# Altium schematic symbol library Inductor.SchLib: 326 symbols (part 5 of 7)
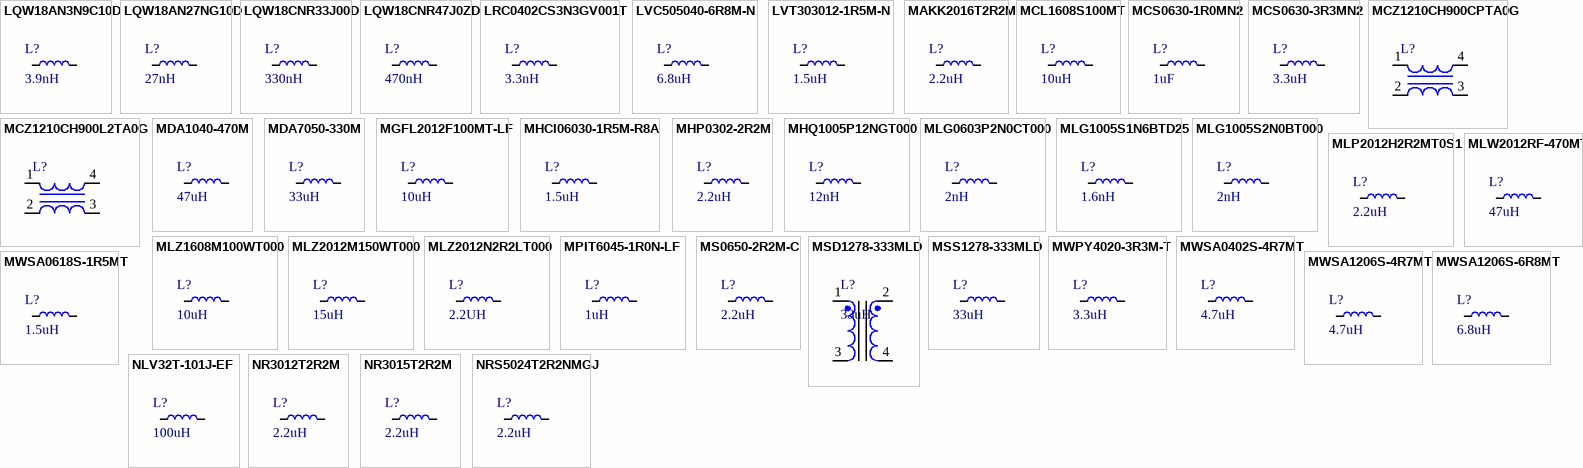
[diagram p12: symbols LQW18AN3N9C10D to NRS5024T2R2NMGJ]

## MLG1005S1N6BTD25
designator L?, comment 1.6nH
1A 1.6nH 50mΩ 0402 Inductors (SMD) ROHS; Manufacturer: TDK; Manufacturer Part Number: MLG1005S1N6BTD25; Core Material: Non-Magnetic,Ceramic; Shielding: Unshielded; DC Resistance (DCR): 120mR; Self Resonant Frequency: 7.5GHz; Test Frequency: 100MHz; Q Factor: 7; Supplier: Digi-Key; Supplier Part Number: 445-16268-1-ND; RoHS: Yes; Category: Fixed Inductors; Stock: 5130; Pricing: 1=0.15, 10=0.132, 25=0.112, 50=0.0988, 100=0.0906, 250=0.08232, 500=0.07738, 1000=0.05927, 2500=0.05598 (USD); Mounting Technology: Surface Mount; Case/Package: 0402; Case Code (Metric): 1005; Case Code (Imperial): 0402; Weight: 2.3E-05oz; Min Operating Temperature: -55°C; Max Operating Temperature: 125°C; Package Quantity: 1; Packaging: Tape and Reel; Current Rating: 1A; Value: 1.6nH; Termination: SMD/SMT; Max DC Current: 1A; Series: MLG; Length: 0.039inch; Width: 0.02inch; Height: 0.5mm; Height - Seated (Max): 0.022inch; Ratings: AEC-Q200; RoHS Compliant: Yes; ComponentLink1URL: https://datasheet.ciiva.com/29696/inductor-automotive-high-frequency-mlg-en-29696023.pdf?src-supplier=Digi-Key; ComponentLink1Description: https://datasheet.ciiva.com/29696/inductor-automotive-high-frequency-mlg-en-29696023.pdf?src-supplier=Digi-Key; ComponentLink2URL: https://datasheet.ciiva.com/29696/inductor-automotive-high-frequency-mlg-en-29696024.pdf?src-supplier=Digi-Key; ComponentLink2Description: https://datasheet.ciiva.com/29696/inductor-automotive-high-frequency-mlg-en-29696024.pdf?src-supplier=Digi-Key; ComponentLink3URL: https://datasheet.ciiva.com/29696/inductor-automotive-high-frequency-mlg-en-29696025.pdf?src-supplier=Digi-Key; ComponentLink3Description: https://datasheet.ciiva.com/29696/inductor-automotive-high-frequency-mlg-en-29696025.pdf?src-supplier=Digi-Key; LCSC Part Number: C404616; Item Type: Inductor
footprint IND-0402
pins: 1, 2

## MLG1005S2N0BT000
designator L?, comment 2nH
900mA 2nH 70mΩ 0402 Inductors (SMD) ROHS; Manufacturer: TDK; Manufacturer Part Number: MLG1005S2N0BT000; Supplier: Arrow Electronics; Supplier Part Number: MLG1005S2N0BT000; RoHS: Yes; Category: Fixed Inductors; Stock: 20000; Pricing: 10000=0.0364, 30000=0.0359, 50000=0.0316, 100000=0.0313 (USD); ComponentLink1URL: https://datasheet.ciiva.com/15987/awq40-15987110.pdf?src-supplier=Onlinecomponents.com; ComponentLink1Description: https://datasheet.ciiva.com/15987/awq40-15987110.pdf?src-supplier=Onlinecomponents.com; ComponentLink2URL: https://datasheet.ciiva.com/29696/inductor-commercial-high-frequency-mlg-en-29696229.pdf?src-supplier=Digi-Key; ComponentLink2Description: https://datasheet.ciiva.com/29696/inductor-commercial-high-frequency-mlg-en-29696229.pdf?src-supplier=Digi-Key; LCSC Part Number: C76769; Item Type: Inductor
footprint IND-0402
pins: 1, 2

## MLP2012H2R2MT0S1
designator L?, comment 2.2uH
FIXED IND 2.2UH 1A 195 MOHM SMD; Manufacturer: TDK; Manufacturer Part Number: MLP2012H2R2MT0S1; Item Type: Inductors; Value: 150mR; ESR: 195mR; Supplier: Digikey; LCSC Part Number: C383369; RoHS: Yes; Stock: 35365; Pricing: 1=0.29, 10=0.2, 25=0.1768, 50=0.1538, 100=0.1372, 250=0.1186 (USD); RMS Current (Irms): 1A; Height: 1mm; Lead Free: 5697LeadFree; ComponentLink1URL: https://datasheet.ciiva.com/29697/inductor-commercial-power-mlp-en-29697706.pdf?src-supplier=Digikey; ComponentLink1Description: https://datasheet.ciiva.com/29697/inductor-commercial-power-mlp-en-29697706.pdf?src-supplier=Digikey; ComponentLink2URL: https://datasheet.ciiva.com/29697/inductor-commercial-power-mlp-en-29697707.pdf?src-supplier=Digikey; ComponentLink2Description: https://datasheet.ciiva.com/29697/inductor-commercial-power-mlp-en-29697707.pdf?src-supplier=Digikey; ComponentLink3URL: https://datasheet.ciiva.com/29697/inductor-commercial-power-mlp-en-29697708.pdf?src-supplier=Digikey; ComponentLink3Description: https://datasheet.ciiva.com/29697/inductor-commercial-power-mlp-en-29697708.pdf?src-supplier=Digikey
footprint Ind-0805 (Inductor 0805)
pins: 1, 2

## MLW2012RF-470MT
designator L?, comment 47uH
280mA 47uH ±20% 3.4Ω 0805 Inductors (SMD) ROHS; Manufacturer: MetalLions; Manufacturer Part Number: MLW2012RF-470MT; Package: 0805; LCSC Part Number: C2844637; Item Type: Inductor; ComponentLink1Description: LCSC; ComponentLink1URL: https://www.lcsc.com/product-detail/Inductors-SMD_MetalLions-MLW2012RF-470MT_C2844637.html
footprint Ind-0805 (Inductor 0805)
pins: 1, 2

## MLZ1608M100WT000
designator L?, comment 10uH
FIXED IND 10UH 250MA 1.05OHM SMD; Manufacturer: TDK; Manufacturer Part Number: MLZ1608M100WT000; Item Type: Inductors; Core Material: Ferrite; Tolerance: 20%; Saturation Current: 90mA; Shielding: Shielded; Value: 1.05R; DC Resistance (DCR): 1.365R; Self Resonant Frequency: 50MHz; Test Frequency: 2MHz; Supplier: Digikey; LCSC Part Number: C76798; RoHS: Yes; Stock: 146199; Pricing: 1=0.14, 10=0.09, 25=0.0804, 50=0.0706, 100=0.0617, 250=0.05292 (USD); Mounting Technology: Surface Mount; Case/Package: 0603; Case Code (Metric): 1608; Case Code (Imperial): 0603; Min Operating Temperature: -55°C; Max Operating Temperature: 125°C; Package Quantity: 4000; Packaging: Cut Tape; Current Rating: 250mA; Series: MLZ; RMS Current (Irms): 250mA; ESR: 1.05R; Length: 0.063inch; Width: 0.031inch; Height: 950um; Height - Seated (Max): 0.037inch; RoHS Compliant: Yes; ComponentLink1URL: https://product.tdk.com/info/en/catalog/datasheets/inductor_commercial_decoupling_mlz1608_en.pdf?src-supplier=Digikey; ComponentLink1Description: https://product.tdk.com/info/en/catalog/datasheets/inductor_commercial_decoupling_mlz1608_en.pdf?src-supplier=Digikey; ComponentLink2URL: https://datasheet.octopart.com/MLZ1608M100WT000-TDK-datasheet-12356712.pdf?src-supplier=Newark; ComponentLink2Description: https://datasheet.octopart.com/MLZ1608M100WT000-TDK-datasheet-12356712.pdf?src-supplier=Newark; ComponentLink3URL: https://datasheet.octopart.com/MLZ1608M100WT000-TDK-datasheet-38159369.pdf?src-supplier=Future+Electronics; ComponentLink3Description: https://datasheet.octopart.com/MLZ1608M100WT000-TDK-datasheet-38159369.pdf?src-supplier=Future+Electronics
footprint IND-0603 (1608 Metric) (0.063" L x 0.032" W (1.60mm x 0.80mm))
pins: 1, 2

## MLZ2012M150WT000
designator L?, comment 15uH
FIXED IND 15UH 250MA 950MOHM SMD; Manufacturer: TDK; Manufacturer Part Number: MLZ2012M150WT000; Item Type: Fixed Inductors; Core Material: Ferrite; Self Resonant Frequency: 40MHz; Tolerance: 20%; Saturation Current: 120mA; Shielding: Shielded; DC Resistance (DCR): 950mR; Test Frequency: 2MHz; ESR: 1.235R; Supplier: Arrow Electronics; LCSC Part Number: C383402; RoHS: Yes; Stock: 144000; Pricing: 2000=0.0432, 10000=0.0391, 24000=0.037, 50000=0.0337 (USD); Mounting Technology: Surface Mount; Case/Package: 0805; Case Code (Metric): 2012; Case Code (Imperial): 0805; Min Operating Temperature: -55°C; Max Operating Temperature: 125°C; Packaging: Cut Tape; Value: 15uH; Series: MLZ; RMS Current (Irms): 250mA; Height: 1.45mm; RoHS Compliant: Yes; ComponentLink1URL: https://datasheet.ciiva.com/29690/inductor-commercial-decoupling-mlz-en-29690328.pdf?src-supplier=Digikey; ComponentLink1Description: https://datasheet.ciiva.com/29690/inductor-commercial-decoupling-mlz-en-29690328.pdf?src-supplier=Digikey; ComponentLink2URL: https://datasheet.ciiva.com/29690/inductor-commercial-decoupling-mlz-en-29690327.pdf?src-supplier=Digikey; ComponentLink2Description: https://datasheet.ciiva.com/29690/inductor-commercial-decoupling-mlz-en-29690327.pdf?src-supplier=Digikey; ComponentLink3URL: https://datasheet.ciiva.com/29690/inductor-commercial-decoupling-mlz-en-29690329.pdf?src-supplier=Digikey; ComponentLink3Description: https://datasheet.ciiva.com/29690/inductor-commercial-decoupling-mlz-en-29690329.pdf?src-supplier=Digikey
footprint IND-0805 (Inductor 0805)
pins: 1, 2

## MLZ2012N2R2LT000
designator L?, comment 2.2UH
FIXED IND 2.2UH 800MA 120MOHM SM; Manufacturer: TDK; Manufacturer Part Number: MLZ2012N2R2LT000; ESR: 156mR; Item Type: Inductor; Supplier: Future Electronics; Supplier Part Number: 3118186; RoHS: Yes; Category: Fixed Inductors; Stock: 28000; Pricing: 4000=0.0406, 8000=0.0396, 16000=0.0387, 20000=0.0383, 60000=0.0365 (USD); RMS Current (Irms): 800mA; LCSC Part Number: C531291; ComponentLink1URL: https://datasheet.ciiva.com/29698/inductor-commercial-decoupling-mlz-en-29698918.pdf?src-supplier=Digikey; ComponentLink1Description: https://datasheet.ciiva.com/29698/inductor-commercial-decoupling-mlz-en-29698918.pdf?src-supplier=Digikey; ComponentLink2URL: https://datasheet.ciiva.com/29698/inductor-commercial-decoupling-mlz-en-29698919.pdf?src-supplier=Digikey; ComponentLink2Description: https://datasheet.ciiva.com/29698/inductor-commercial-decoupling-mlz-en-29698919.pdf?src-supplier=Digikey; ComponentLink3URL: https://datasheet.ciiva.com/29698/inductor-commercial-decoupling-mlz-en-29698920.pdf?src-supplier=Digikey; ComponentLink3Description: https://datasheet.ciiva.com/29698/inductor-commercial-decoupling-mlz-en-29698920.pdf?src-supplier=Digikey
footprint Ind-0805 (Inductor 0805)
pins: 1, 2

## MPIT6045-1R0N-LF
designator L?, comment 1uH
5.15A 1uH ±30% SMD Power Inductors ROHS; Manufacturer: microgate; Manufacturer Part Number: MPIT6045-1R0N-LF; Package: SMD; LCSC Part Number: C486570; Item Type: INductor; ComponentLink1Description: LCSC; ComponentLink1URL: https://www.lcsc.com/product-detail/Power-Inductors_microgate-MPIT6045-1R0N-LF_C486570.html
footprint MPIT6045-1R0N-LF
pins: 1, 2

## MS0650-2R2M-C
designator L?, comment 2.2uH
9.5A 2.2uH ±20% 16A SMD,7.15x6.6x5mm Power Inductors ROHS; Manufacturer: COILMX; Manufacturer Part Number: MS0650-2R2M-C; Package: SMD,7.15x6.6x5mm; LCSC Part Number: C18199494; Item Type: Inductor; ComponentLink1Description: LCSC; ComponentLink1URL: https://www.lcsc.com/product-detail/Power-Inductors_COILMX-MS0650-2R2M-C_C18199494.html
footprint MS0650-2R2M-C
pins: 1, 2

## MSD1278-333MLD
designator L?, comment 33uH
Coupled Inductors 33uH Shld 20% 2.25A 150mOhms; Manufacturer: Coilcraft; Manufacturer Part Number: MSD1278-333MLD; Core Material: Ferrite; Inductance - Series: 132uH; Supplier: Mouser; LCSC Part Number: C20417040; RoHS: Yes; Item Type: Inductors; Stock: 126; Pricing: 1=3.14, 10=3.14, 50=3.14, 100=3.14, 1000=1.43, 10000=1.43 (USD); Min Operating Temperature: -40°C; Max Operating Temperature: 85°C; Packaging: Tape and Reel; Package Quantity: 500; Tolerance: 20%; Max DC Current: 2.25A; Termination: SMD/SMT; Inductance - Parallel: 33uH; Series: MSD1278; Length: 12.3mm; Width: 12.3mm; Height: 8.05mm; Lead Free: Contains Lead; RoHS Compliant: Yes; ComponentLink1URL: https://datasheet.ciiva.com/12378/msd1278-12378028.pdf?src-supplier=Mouser; ComponentLink1Description: https://datasheet.ciiva.com/12378/msd1278-12378028.pdf?src-supplier=Mouser
footprint MSD1278-333MLD
pins: 1, 2, 3, 4

## MSS1278-333MLD
designator L?, comment 33uH
POWER INDUCTOR, SHIELDED, 10/20%; Manufacturer: Coilcraft; Manufacturer Part Number: MSS1278-333MLD; Item Type: Inductors; Core Material: Ferrite; Self Resonant Frequency: 9.5MHz; Tolerance: 20%; Max DC Current: 3.1A; Test Frequency: 100kHz; Saturation Current: 5.22A; Supplier: Mouser; RoHS: Yes; Stock: 37813; Pricing: 1=2.92, 10=2.92, 50=2.92, 100=2.92, 1000=1.19, 10000=1.19 (USD); Mounting Technology: Surface Mount; Case/Package: SMD/SMT; Min Operating Temperature: -40°C; Max Operating Temperature: 85°C; Packaging: Tape and Reel; Package Quantity: 500; Shielding: Shielded; Value: 33uH; Termination: SMD/SMT; Series: MSS1278; Inductance Tolerance: 20%; RMS Current (Irms): 3.1A; Length: 12.3mm; Width: 12.3mm; Height: 8.05mm; Lead Free: Contains Lead; RoHS Compliant: Yes; Reach SVHC Compliant: No; ComponentLink1URL: https://datasheet.ciiva.com/22707/1681956-22707189.pdf?src-supplier=Element14; ComponentLink1Description: https://datasheet.ciiva.com/22707/1681956-22707189.pdf?src-supplier=Element14; ComponentLink2URL: https://datasheet.ciiva.com/22707/1681956-22707190.pdf?src-supplier=Element14; ComponentLink2Description: https://datasheet.ciiva.com/22707/1681956-22707190.pdf?src-supplier=Element14; ComponentLink3URL: https://datasheet.ciiva.com/13320/mss1278-270709-13320521.pdf?src-supplier=Mouser; ComponentLink3Description: https://datasheet.ciiva.com/13320/mss1278-270709-13320521.pdf?src-supplier=Mouser
footprint MSS1278-333MLD
pins: 1, 2

## MWPY4020-3R3M-T
designator L?, comment 3.3uH
1.4A 3.3uH ±20% 0.07Ω 3.2A SMD,4x4x2mm Power Inductors ROHS; Manufacturer: Me-TECH; Manufacturer Part Number: MWPY4020-3R3M-T; Footprint: Footprint; ComponentLink1Description: LCSC; ComponentLink1URL: https://lcsc.com/product-detail/Power-Inductors_Me-TECH-MWPY4020-3R3M-T_C2934994.html; LCSC Part Number: C2934994
footprint MWPY4020-3R3M-T_
pins: 1, 2

## MWSA0402S-4R7MT
designator L?, comment 4.7uH
Fixed Ind 4.7UH 2.8A 105MOHM SMD; Manufacturer: Sunlord; Manufacturer Part Number: MWSA0402S-4R7MT; Item Type: Inductor; Supplier 1: Digi-Key; RoHS: No; Category: Fixed Inductors; Stock 1: 2808; Pricing 1: 1=0.88000, 10=0.82100, 25=0.75760, 50=0.63120, 100=0.59340, 250=0.53024, 500=0.45450, 1000=0.40400 (USD); Supplier Part Number 1: 3442-MWSA0402S-4R7MTCT-ND; LCSC Part Number: C408337
footprint MWSA0402S-4R7MT
pins: 1, 2

## MWSA0618S-1R5MT
designator L?, comment 1.5uH
Fixed Ind 1.5UH 8A 26 Mohm SMD; Manufacturer: Sunlord; Manufacturer Part Number: MWSA0618S-1R5MT; Item Type: Inductor; Supplier 1: DigiKey; Stock 1: 1500; Pricing 1: 1=1.24000, 10=1.14900, 25=1.06040, 50=0.88380, 100=0.83070, 250=0.74236, 500=0.63630 (USD); Supplier Part Number 1: 3442-MWSA0618S-1R5MTCT-ND; LCSC Part Number: C408418; ComponentLink1Description: LCSC; ComponentLink1URL: https://www.lcsc.com/product-detail/Power-Inductors_Sunlord-MWSA0618S-1R5MT_C408418.html
footprint MWSA0618S-1R5MT
pins: 1, 2

## MWSA1206S-4R7MT
designator L?, comment 4.7uH
15A 4.7uH ±20% 24A SMD,13.5x12.6mm Power Inductors ROHS; Manufacturer: Sunlord; Manufacturer Part Number: MWSA1206S-4R7MT; Supplier: Digikey; Supplier Part Number: 3442-MWSA1206S-4R7MTCT-ND; RoHS: No; Item Type: Inductors; Stock: 195; Pricing: 1=1.67, 10=1.417, 25=1.3056, 50=1.1666, 100=0.9721, 250=0.94436 (USD); LCSC Part Number: C408521
footprint SMD,13.5x12.6mm
pins: 1, 2

## MWSA1206S-6R8MT
designator L?, comment 6.8uH
Fixed Ind 6.8UH 12A 13.5MOHM SMD; Manufacturer: Sunlord; Manufacturer Part Number: MWSA1206S-6R8MT; Item Type: Inductor; Supplier: Digikey; LCSC Part Number: C408523; RoHS: No; Stock: 495; Pricing: 1=1.68, 10=1.302, 25=1.1772, 50=1.0908, 100=1.0103, 250=0.91272 (USD)
footprint MWSA1206S-6R8MT
pins: 1, 2

## NLV32T-101J-EF
designator L?, comment 100uH
FIXED IND 100UH 40MA 10 OHM SMD; Manufacturer: TDK; Manufacturer Part Number: NLV32T-101J-EF; Item Type: Inductors; Core Material: Ferrite; Tolerance: 5%; Shielding: Unshielded; DC Resistance (DCR): 10R; Self Resonant Frequency: 10MHz; Test Frequency: 796kHz; Q Factor: 20; Supplier: Mouser; LCSC Part Number: C295124; RoHS: Yes; Stock: 17406; Pricing: 1=0.22, 10=0.113, 50=0.113, 100=0.103, 1000=0.1, 10000=0.067 (USD); Mounting Technology: Surface Mount; Case/Package: 1210; Case Code (Metric): 3225; Case Code (Imperial): 1210; Weight: 0.001764oz; Min Operating Temperature: -40°C; Max Operating Temperature: 105°C; Package Quantity: 2000; Packaging: Tape and Reel; Current Rating: 40mA; Value: 100uH; Termination: SMD/SMT; Max DC Current: 40mA; Series: NLV-EF; Length: 0.126inch; Width: 0.098inch; Height: 2.2mm; Height - Seated (Max): 0.094inch; RoHS Compliant: Yes; Lead Free: Lead Free; ComponentLink1URL: http://www.mouser.com/ds/2/400/nductor_automotive_standard_nlv32-pfd_en-785075.pdf?src-supplier=Mouser; ComponentLink1Description: http://www.mouser.com/ds/2/400/nductor_automotive_standard_nlv32-pfd_en-785075.pdf?src-supplier=Mouser; ComponentLink2URL: https://product.tdk.com/info/en/catalog/datasheets/inductor_commercial_standard_nlv32-ef_en.pdf?src-supplier=Digikey; ComponentLink2Description: https://product.tdk.com/info/en/catalog/datasheets/inductor_commercial_standard_nlv32-ef_en.pdf?src-supplier=Digikey; ComponentLink3URL: https://product.tdk.com/info/en/catalog/datasheets/inductor_commercial_standard_nlv32-ef_en.pdf?ref_disty=digikey&src-supplier=Digikey; ComponentLink3Description: https://product.tdk.com/info/en/catalog/datasheets/inductor_commercial_standard_nlv32-ef_en.pdf?ref_disty=digikey&src-supplier=Digikey
footprint NLV32T-101J-EF
pins: 1, 2

## NR3012T2R2M
designator L?, comment 2.2uH
FIXED IND 2.2UH 1.2A 96 MOHM SMD; Manufacturer: Taiyo Yuden; Manufacturer Part Number: NR3012T2R2M; Item Type: Inductors; Supplier 1: Digikey; RoHS: Yes; Stock 1: 5366; Pricing 1: 1=0.24, 10=0.196, 25=0.1812, 50=0.166, 100=0.1463, 250=0.14184, 500=0.12674, 1000=0.10625 (USD); ComponentLink1URL: https://datasheet.ciiva.com/8499/nr3012t2r2m-ss-8499238.pdf?src-supplier=Avnet; ComponentLink1Description: https://datasheet.ciiva.com/8499/nr3012t2r2m-ss-8499238.pdf?src-supplier=Avnet; ComponentLink2URL: https://datasheet.ciiva.com/1043/wound04-e-1043497.pdf?src-supplier=Digikey; ComponentLink2Description: https://datasheet.ciiva.com/1043/wound04-e-1043497.pdf?src-supplier=Digikey; ComponentLink3URL: https://datasheet.ciiva.com/1043/wound04-e-1043498.pdf?src-supplier=Digikey; ComponentLink3Description: https://datasheet.ciiva.com/1043/wound04-e-1043498.pdf?src-supplier=Digikey; ComponentLink4URL: https://datasheet.ciiva.com/1043/wound04-e-1043499.pdf?src-supplier=Digikey; ComponentLink4Description: https://datasheet.ciiva.com/1043/wound04-e-1043499.pdf?src-supplier=Digikey; ComponentLink5URL: https://datasheet.ciiva.com/8002/wound04-e-8002122.pdf?src-supplier=Element14; ComponentLink5Description: https://datasheet.ciiva.com/8002/wound04-e-8002122.pdf?src-supplier=Element14; Supplier Part Number 1: 587-1642-1-ND; LCSC Part Number: C525010
footprint NR3012T2R2M
pins: 1, 2

## NR3015T2R2M
designator L?, comment 2.2uH
FIXED IND 2.2UH 1.5A 72 MOHM SMD; Manufacturer: Taiyo Yuden; Manufacturer Part Number: NR3015T2R2M; Item Type: Inductor; Core Material: Ferrite; Self Resonant Frequency: 64MHz; Shielding: Shielded; Current Rating: 1.48A; Inductance Tolerance: 20%; DC Resistance (DCR): 72mR; Test Frequency: 100kHz; Supplier: Digikey; LCSC Part Number: C86423; RoHS: Yes; Stock: 131557; Pricing: 1=0.32, 10=0.263, 25=0.2424, 50=0.2222, 100=0.1959, 250=0.18988, 500=0.16968, 1000=0.13736 (USD); Case/Package: 3015; Pins: 2; Min Operating Temperature: -25°C; Max Operating Temperature: 120°C; Packaging: Tape and Reel; Value: 2.2uH; Package Quantity: 1; Saturation Current: 1.48A; Tolerance: 20%; Max DC Current: 1.5A; Termination: SMD/SMT; RMS Current (Irms): 1.5A; Series: NR; ESR: 72mR; Length: 0.118inch; Width: 0.118inch; Height: 1.5mm; Height - Seated (Max): 0.059inch; Halogen Free: Halogen Free; Lead Free: Lead Free; Reach SVHC Compliant: Unknown; RoHS Compliant: Yes; ComponentLink1URL: https://datasheet.ciiva.com/8002/1734585-8002131.pdf?src-supplier=Element14; ComponentLink1Description: https://datasheet.ciiva.com/8002/1734585-8002131.pdf?src-supplier=Element14; ComponentLink2URL: https://datasheet.ciiva.com/8002/nr3015t2r2m-ss-8002130.pdf?src-supplier=Element14; ComponentLink2Description: https://datasheet.ciiva.com/8002/nr3015t2r2m-ss-8002130.pdf?src-supplier=Element14; ComponentLink3URL: https://datasheet.ciiva.com/8499/nr3015t2r2m-ss-8499257.pdf?src-supplier=Avnet; ComponentLink3Description: https://datasheet.ciiva.com/8499/nr3015t2r2m-ss-8499257.pdf?src-supplier=Avnet; ComponentLink4URL: https://datasheet.ciiva.com/15988/279nr3015t2r2m-15988078.pdf?src-supplier=Onlinecomponents.com; ComponentLink4Description: https://datasheet.ciiva.com/15988/279nr3015t2r2m-15988078.pdf?src-supplier=Onlinecomponents.com; ComponentLink5URL: https://datasheet.ciiva.com/1043/wound04-e-1043235.pdf?src-supplier=Digikey; ComponentLink5Description: https://datasheet.ciiva.com/1043/wound04-e-1043235.pdf?src-supplier=Digikey; ComponentLink6URL: https://datasheet.ciiva.com/1043/wound04-e-1043234.pdf?src-supplier=Digikey; ComponentLink6Description: https://datasheet.ciiva.com/1043/wound04-e-1043234.pdf?src-supplier=Digikey; ComponentLink7URL: https://datasheet.ciiva.com/1043/wound04-e-1043236.pdf?src-supplier=Digikey; ComponentLink7Description: https://datasheet.ciiva.com/1043/wound04-e-1043236.pdf?src-supplier=Digikey
footprint NR3015T2R2M
pins: 1, 2

## NRS5024T2R2NMGJ
designator L?, comment 2.2uH
FIXED IND 2.2UH 3.1A 29 MOHM SMD; Manufacturer: Taiyo Yuden; Manufacturer Part Number: NRS5024T2R2NMGJ; Core Material: Ferrite; Saturation Current: 4.1A; Shielding: Shielded; DC Resistance (DCR): 29mR; Self Resonant Frequency: 51MHz; Test Frequency: 100kHz; Tolerance: 30%; Item Type: Inductor; Supplier: Digi-Key; Supplier Part Number: 587-6102-1-ND; RoHS: Yes; Category: Fixed Inductors; Stock: 19904; Pricing: 1=0.28, 10=0.247, 25=0.212, 50=0.1944, 100=0.1768, 250=0.16616, 500=0.14848, 1000=0.12019 (USD); Mounting Technology: Surface Mount; Case/Package: Nonstandard; Min Operating Temperature: -25°C; Max Operating Temperature: 120°C; Packaging: Tape and Reel; Resistor Type: Wirewound; Value: 2.2uH; Current Rating: 3.1A; Length: 0.193inch; Width: 0.193inch; Height - Seated (Max): 0.094inch; RoHS Compliant: Yes; ComponentLink1URL: https://datasheet.octopart.com/NRS5024T2R2NMGJ-Taiyo-Yuden-datasheet-99833426.pdf?src-supplier=Future+Electronics; ComponentLink1Description: https://datasheet.octopart.com/NRS5024T2R2NMGJ-Taiyo-Yuden-datasheet-99833426.pdf?src-supplier=Future+Electronics; ComponentLink2URL: http://ds.yuden.co.jp/TYCOMPAS/ut/detail.do?productNo=NRS5024T2R2NMGJ&fileName=NRS5024T2R2NMGJ_SS&mode=specSheetDownload&src-supplier=Digi-Key; ComponentLink2Description: http://ds.yuden.co.jp/TYCOMPAS/ut/detail.do?productNo=NRS5024T2R2NMGJ&fileName=NRS5024T2R2NMGJ_SS&mode=specSheetDownload&src-supplier=Digi-Key; ComponentLink3URL: https://ds.yuden.co.jp/TYCOMPAS/ut/detail?pn=NRS5024T2R2NMGJ  &amp;u=M&src-supplier=Digi-Key; ComponentLink3Description: https://ds.yuden.co.jp/TYCOMPAS/ut/detail?pn=NRS5024T2R2NMGJ  &amp;u=M&src-supplier=Digi-Key; LCSC Part Number: C222926
footprint NRS5024T2R2NMGJ
pins: 1, 2

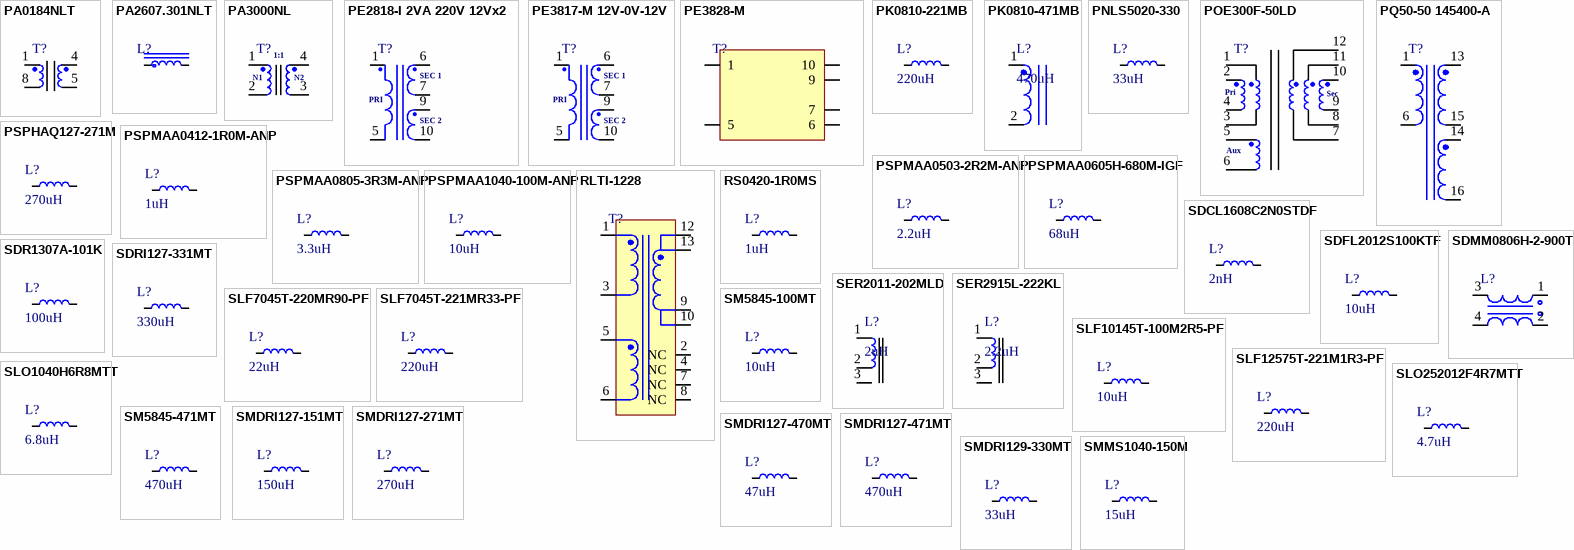
[diagram p5: symbols PA0184NLT to SMMS1040-150M]

## PA0184NLT
designator T?
PULSE XFMR 1:1 1.2MH; Manufacturer Part Number: PA0184NLT; Item Type: Transformers; Supplier: Avnet; Supplier Part Number: PA0184NLT; Manufacturer: Pulse; RoHS: Yes; Stock: 400; Pricing: 400=1.7661, 800=1.72956, 1600=1.69302, 2400=1.65648, 3200=1.61994, 4000=1.5834, 40000=1.55295 (USD); ComponentLink1URL: https://datasheet.ciiva.com/2939/+spm2007-61-2939809.pdf?src-supplier=Digikey; ComponentLink1Description: https://datasheet.ciiva.com/2939/+spm2007-61-2939809.pdf?src-supplier=Digikey; ComponentLink2URL: https://datasheet.ciiva.com/2939/+spm2007-61-2939810.pdf?src-supplier=Digikey; ComponentLink2Description: https://datasheet.ciiva.com/2939/+spm2007-61-2939810.pdf?src-supplier=Digikey; ComponentLink3URL: https://datasheet.ciiva.com/2939/+spm2007-61-2939811.pdf?src-supplier=Digikey; ComponentLink3Description: https://datasheet.ciiva.com/2939/+spm2007-61-2939811.pdf?src-supplier=Digikey
footprint PA0184NLT
pins: 1, 4, 5, 8

## PA2607.301NLT
designator L?
FIXED IND 300NH 27A 0.29MOHM SMD; Manufacturer: Pulse; Manufacturer Part Number: PA2607.301NLT; Item Type: Inductor; Supplier: Mouser; Supplier Part Number: 673-PA2607.301NLT; RoHS: Yes; Stock: 205; Pricing: 1=1.69, 10=1.19, 50=1.19, 100=0.956, 1000=0.796, 10000=0.795 (USD); ComponentLink1URL: https://datasheet.ciiva.com/15023/+p673-15023974.pdf?src-supplier=Digikey; ComponentLink1Description: https://datasheet.ciiva.com/15023/+p673-15023974.pdf?src-supplier=Digikey; ComponentLink2URL: https://datasheet.ciiva.com/15023/+p673-15023975.pdf?src-supplier=Digikey; ComponentLink2Description: https://datasheet.ciiva.com/15023/+p673-15023975.pdf?src-supplier=Digikey; ComponentLink3URL: https://datasheet.ciiva.com/15023/+p673-15023976.pdf?src-supplier=Digikey; ComponentLink3Description: https://datasheet.ciiva.com/15023/+p673-15023976.pdf?src-supplier=Digikey; ComponentLink4URL: https://datasheet.ciiva.com/8499/+p673-8499369.pdf?src-supplier=Avnet; ComponentLink4Description: https://datasheet.ciiva.com/8499/+p673-8499369.pdf?src-supplier=Avnet
footprint PA2607.301NLT
pins: 1, 2

## PA3000NL
designator T?
Pulse Transformer 1:1 Through Hole; Manufacturer Part Number: PA3000NL; Item Type: Transformers; Supplier: Mouser; Supplier Part Number: 673-PA3000NL; Manufacturer: Pulse; RoHS: Yes; Stock: 1250; Pricing: 1=8.57, 10=6.73, 50=6.55, 100=5.33, 1000=5.03, 10000=5.03 (USD); RoHS Compliant: Yes
footprint PA3000NL
pins: 1, 2, 3, 4
text: 1:1; N1; N2

## PE2818-I 2VA 220V 12Vx2
designator T?
Power 2VA 220V / 6Vx2/7.5Vx2/9Vx2/12Vx2/15Vx2/18Vx2/24Vx2 Encapsulated For PCB Mounted Isolation Transformer; Manufacturer: YHDC; Manufacturer Part Number: PE2818-I; Item Type: Transformer; ComponentLink1Description: LCSC; ComponentLink1URL: https://vi.aliexpress.com/item/32737778653.html?gatewayAdapt=4itemAdapt
footprint PE2818-I
pins: 1, 5, 6, 7, 9, 10
text: SEC 1; PRI; SEC 2

## PE3817-M 12V-0V-12V
designator T?
Vacuum Epoxy Encapsulated,PCB mounting, Pirmary voltage: 110V/220V/230V/380.; Manufacturer: YHDC; Manufacturer Part Number: PE3817-M; Item Type: Transformer; ComponentLink1Description: LCSC; ComponentLink1URL: https://vi.aliexpress.com/item/32737640605.html?spm=a2g0o.productlist.main.1.9e8c53b8DhDv65&algo_pvid=dfbf5521-a82b-4f41-a663-463eb69d6f12&algo_exp_id=dfbf5521-a82b-4f41-a663-463eb69d6f12-0&pdp_npi=4%40dis%21USD%212.76%212.76%21%21%212.76%21%21%402101fb1816980403049242369e75cd%2112000034040116544%21sea%21PK%21821782294%21&curPageLogUid=ULPY5vETnG3z&gatewayAdapt=glo2vnm
footprint PE3817-M 12V-0V-12V
pins: 1, 5, 6, 7, 9, 10
text: SEC 1; PRI; SEC 2

## PE3828-M
designator T?
Encapsulated Transformer 9VA; Manufacturer: YHDC; Manufacturer Part Number: PE3828-M; Package: -; LCSC Part Number: -; Item Type: Transformer; ComponentLink1Description: Aliexpress; ComponentLink1URL: https://vi.aliexpress.com/item/1005008203641696.html
footprint PE3828-M
pins: 1, 5, 6, 7, 9, 10

## PK0810-221MB
designator L?, comment 220uH
600mA 220uH EI-core Inductor ±20% Plugin Power Inductors ROHS; Manufacturer: SXN; Manufacturer Part Number: PK0810-221MB; Package: Plugin; LCSC Part Number: C400317; Item Type: Inductor; ComponentLink1Description: LCSC; ComponentLink1URL: https://www.lcsc.com/product-detail/Power-Inductors_SXN-Shun-Xiang-Nuo-Elec-PK0810-221MB_C400317.html
footprint PK0810-221MB
pins: 1, 2

## PK0810-471MB
designator L?, comment 470uH
420mA 470uH EI-core Inductor ±20% Plugin Power Inductors ROHS; Manufacturer: SXN(Shun Xiang Nuo Elec); Manufacturer Part Number: PK0810-471MB; Package: Plugin; LCSC Part Number: C400319; Item Type: Inductor; ComponentLink1Description: LCSC; ComponentLink1URL: https://www.lcsc.com/product-detail/Power-Inductors_SXN-Shun-Xiang-Nuo-Elec-PK0810-471MB_C400319.html
footprint PK0810-471MB
pins: 1, 2

## PNLS5020-330
designator L?, comment 33uH
1A 33uH ±20% 356mΩ SMD,5x5x2mm Power Inductors ROHS; Manufacturer: DMBJ; Manufacturer Part Number: PNLS5020-330; Footprint: Custom; ComponentLink1Description: LCSC; ComponentLink1URL: https://www.lcsc.com/product-detail/Power-Inductors_DMBJ-PNLS5020-330_C2849490.html; LCSC Part Number: C2849490
footprint PNLS5020-330
pins: 1, 2

## POE300F-50LD
designator T?
Audio Transformers / Signal Transformers POE300F Flyback PoE+ 30uH 5.0 V 6 A; Manufacturer: Coilcraft; Manufacturer Part Number: POE300F-50LD; Supplier: Mouser; Supplier Part Number: 994-POE300F-50LD; RoHS: Yes; Item Type: Transformers; Stock: 1314; Pricing: 1=10.53, 10=10.53, 50=10.53, 100=10.53, 1000=4.8, 10000=4.8 (USD); Packaging: Tape and Reel; Package Quantity: 175; Series: POE300F; Length: 21mm; Width: 20.57mm; Height: 11.43mm; Lead Free: Contains Lead; RoHS Compliant: Yes; ComponentLink1URL: http://www.mouser.com/ds/2/597/poe300-463486.pdf?src-supplier=Mouser; ComponentLink1Description: http://www.mouser.com/ds/2/597/poe300-463486.pdf?src-supplier=Mouser
footprint POE300F-50LD
pins: 1, 2, 3, 4, 5, 6, 7, 8, 9, 10, 11, 12
text: Pri; Sec; Aux

## PQ50-50 145400-A
designator T?
Manufacturer: Texas Instruments; Manufacturer Part Number: PQ50-50 145400-A; Item Type: Transformer; Package: Custom; LCSC Part Number: -; ComponentLink1Description: Supplier; ComponentLink1URL: https://www.bourns.com/products/magnetic-products/kaschke-components
footprint PQ50-50 145400-A
pins: 1, 6, 13, 14, 15, 16

## PSPHAQ127-271M
designator L?, comment 270uH
1.4A 270uH ±20% 1.4A SMD,12x12mm Power Inductors ROHS; Manufacturer: PROD Tech; Manufacturer Part Number: PSPHAQ127-271M; Package: SMD,12x12mm; LCSC Part Number: C2983078; Item Type: Inductor; ComponentLink1Description: LCSC; ComponentLink1URL: https://www.lcsc.com/product-detail/Power-Inductors_PROD-Tech-PSPHAQ127-271M_C2983078.html
footprint PSPHAQ127-271M
pins: 1, 2

## PSPMAA0412-1R0M-ANP
designator L?, comment 1uH
4.5A 1uH ±20% 70mΩ 5.5A SMD,4.2x4.4x1.2mm Power Inductors ROHS; Manufacturer: PROD Tech; Manufacturer Part Number: PSPMAA0412-1R0M-ANP; ComponentLink1Description: LCSC; ComponentLink1URL: https://lcsc.com/product-detail/Power-Inductors_PROD-Tech-PSPMAA0412-1R0M-ANP_C705331.html; Footprint: Custom; LCSC Part Number: C705331
footprint PSPMAA0412-1R0M-ANP_ (IND SMD 1uH)
pins: 1, 2

## PSPMAA0503-2R2M-ANP
designator L?, comment 2.2uH
5.5A 2.2uH ±20% 7.5A SMD,5.2x5.4x3mm Power Inductors ROHS; Manufacturer: PROD Tech; Manufacturer Part Number: PSPMAA0503-2R2M-ANP; Package: SMD,5.2x5.4x3mm; LCSC Part Number: C436533; Item Type: Inductor; ComponentLink1Description: LCSC; ComponentLink1URL: https://www.lcsc.com/product-detail/Power-Inductors_PROD-Tech-PSPMAA0503-2R2M-ANP_C436533.html
footprint PSPMAA0503-2R2M-ANP
pins: 1, 2

## PSPMAA0605H-680M-IGF
designator L?, comment 68uH
2A 68uH ±20% 2.5A SMD,6.6x7.1mm Power Inductors ROHS; Manufacturer: PROD Tech; Manufacturer Part Number: PSPMAA0605H-680M-IGF; Package: SMD,6.6x7.1mm; LCSC Part Number: C2983094; Item Type: Inductor; ComponentLink1Description: LCSC; ComponentLink1URL: https://www.lcsc.com/product-detail/Power-Inductors_PROD-Tech-PSPMAA0605H-680M-IGF_C2983094.html
footprint PSPMAA0605H-680M-IGF
pins: 1, 2

## PSPMAA0805-3R3M-ANP
designator L?, comment 3.3uH
11A 3.3uH ±20% 17A SMD,8x8.5mm Power Inductors ROHS; Manufacturer: PROD Tech; Manufacturer Part Number: PSPMAA0805-3R3M-ANP; Package: SMD,8x8.5mm; LCSC Part Number: C2962881; Item Type: Inductor; ComponentLink1Description: LCSC; ComponentLink1URL: https://www.lcsc.com/product-detail/Power-Inductors_PROD-Tech-PSPMAA0805-3R3M-ANP_C2962881.html
footprint PSPMAA0805-3R3M-ANP
pins: 1, 2

## PSPMAA1040-100M-ANP
designator L?, comment 10uH
7A 10uH ±20% 10A SMD,10.3x10.5mm Power Inductors ROHS; Manufacturer: PROD Tech; Manufacturer Part Number: PSPMAA1040-100M-ANP; Package: SMD,10.3x10.5mm; LCSC Part Number: C2983105; Item Type: Inductor; ComponentLink1Description: LCSC; ComponentLink1URL: https://www.lcsc.com/product-detail/Power-Inductors_PROD-Tech-PSPMAA1040-100M-ANP_C2983105.html
footprint PSPMAA1040-100M-ANP
pins: 1, 2

## RLTI-1228
designator T?
Item Type: Transformer; Manufacturer Part Number: RLTI-1228
footprint RLTI-1228
pins: 1, 2 NC, 3, 4 NC, 5, 6, 7 NC, 8 NC, 9, 10, 12, 13

## RS0420-1R0MS
designator L?, comment 1uH
4.5A 1uH Integrated molded inductor ±20% 7A SMD,4.4x4.2mm Power Inductors ROHS; Manufacturer: Ruishen; Manufacturer Part Number: RS0420-1R0MS; Package: SMD,4.4x4.2mm; LCSC Part Number: C32712969; Item Type: Inductor; ComponentLink1Description: LCSC; ComponentLink1URL: https://www.lcsc.com/product-detail/Power-Inductors_Ruishen-RS0420-1R0MS_C32712969.html
footprint RS0420-1R0MS
pins: 1, 2

## SDCL1608C2N0STDF
designator L?, comment 2nH
2nH ±0.3nH 0603 Inductors; Manufacturer: Sunlord; Manufacturer Part Number: SDCL1608C2N0STDF; Footprint: 0603; ComponentLink1Description: LCSC; ComponentLink1URL: https://lcsc.com/product-detail/Inductors-SMD_Sunlord-SDCL1608C2N0STDF_C370234.html; Value: 2nH; LCSC Part Number: C370234
footprint IND-0603 (1608 Metric) (0.063" L x 0.032" W (1.60mm x 0.80mm))
pins: 1, 2

## SDFL2012S100KTF
designator L?, comment 10uH
15mA 10uH ±10% 1.15Ω 0805 Inductors (SMD) ROHS; Manufacturer: Sunlord; Manufacturer Part Number: SDFL2012S100KTF; Package: 0805; LCSC Part Number: C1046; Item Type: Inductor; ComponentLink1Description: LCSC; ComponentLink1URL: https://jlcpcb.com/partdetail/Sunlord-SDFL2012S100KTF/C1046
footprint Ind-0805 (Inductor 0805)
pins: 1, 2

## SDMM0806H-2-900T
designator L?
90Ω@100MHz 4Ω 2 0302 Common Mode Filters ROHS; Manufacturer: Sunlord; Manufacturer Part Number: SDMM0806H-2-900T; Package: 0302; LCSC Part Number: C370285; Item Type: Common Mode Filter; ComponentLink1Description: LCSC; ComponentLink1URL: https://www.lcsc.com/product-detail/Common-Mode-Filters_Sunlord-SDMM0806H-2-900T_C370285.html
footprint 0302
pins: 1, 2, 3, 4

## SDR1307A-101K
designator L?, comment 100uH
Ind Power Unshielded Wirewound 100uH 10% 100KHz 25Q-Factor Ferrite 1.9A T/R; Manufacturer: Bourns; Manufacturer Part Number: SDR1307A-101K; Item Type: Inductor; Supplier: Digi-Key; Supplier Part Number: SDR1307A-101KCT-ND; RoHS: Yes; Category: Fixed Inductors; Stock: 2952; Pricing: 1=1.16, 10=0.982, 25=0.8928, 50=0.8392, 100=0.6964 (USD); ComponentLink1URL: https://datasheet.ciiva.com/46435/1778094-46435133.pdf?src-supplier=Element14; ComponentLink1Description: https://datasheet.ciiva.com/46435/1778094-46435133.pdf?src-supplier=Element14; LCSC Part Number: C2042930; ComponentLink2Description: LCSC; ComponentLink2URL: https://www.lcsc.com/product-detail/Power-Inductors_BOURNS-SDR1307A-101K_C2042930.html
footprint SDR1307A-101K
pins: 1, 2

## SDRI127-331MT
designator L?, comment 330uH
330uH Shielded Power Inductors ±20% 1.9A SMD,12.5x12.5mm Power Inductors ROHS; Manufacturer: LanTu Micro; Manufacturer Part Number: SDRI127-331MT; Package: SMD,12.5x12.5mm; LCSC Part Number: C5127292; Item Type: Inductor
footprint SDRI127-331MT
pins: 1, 2

## SER2011-202MLD
designator L?, comment 2uH
FIXED IND 2UH 40A 1.34MOHM SM; Manufacturer: Coilcraft; Manufacturer Part Number: SER2011-202MLD; Core Material: Ferrite; Tolerance: 20%; Self Resonant Frequency: 56MHz; Shielding: Shielded; DC Resistance (DCR): 1.2mR; Test Frequency: 100kHz; Saturation Current: 37A; Item Type: Inductor; Supplier: Mouser; Supplier Part Number: 994-SER2011-202MLD; RoHS: Yes; Category: Fixed Inductors; Stock: 1078; Pricing: 1=3.01, 10=3.01, 50=3.01, 100=3.01, 1000=2.19, 10000=2.19 (USD); Pins: 3; Min Operating Temperature: -40°C; Max Operating Temperature: 85°C; Packaging: Tape and Reel; Value: 2uH; Max DC Current: 40A; Termination: SMD/SMT; Series: SER2011; Inductance Tolerance: 20%; DC Current: 40A; RMS Current (Irms): 40A; Length: 19.69mm; Width: 19.55mm; Height: 10.67mm; Depth: 19.56mm; Radiation Hardening: No; Lead Free: Contains Lead; RoHS Compliant: Yes; Reach SVHC Compliant: No; Military Standard: Not; ComponentLink1URL: https://datasheet.ciiva.com/15211/getdatasheetpartid-476881-15211386.pdf?src-supplier=Verical; ComponentLink1Description: https://datasheet.ciiva.com/15211/getdatasheetpartid-476881-15211386.pdf?src-supplier=Verical; ComponentLink2URL: https://datasheet.ciiva.com/46438/1681979-46438646.pdf?src-supplier=Element14; ComponentLink2Description: https://datasheet.ciiva.com/46438/1681979-46438646.pdf?src-supplier=Element14; ComponentLink3URL: https://datasheet.ciiva.com/46438/1681979-46438647.pdf?src-supplier=Element14; ComponentLink3Description: https://datasheet.ciiva.com/46438/1681979-46438647.pdf?src-supplier=Element14; ComponentLink4URL: https://datasheet.ciiva.com/46438/1681979-46438648.pdf?src-supplier=Element14; ComponentLink4Description: https://datasheet.ciiva.com/46438/1681979-46438648.pdf?src-supplier=Element14; ComponentLink5URL: https://datasheet.ciiva.com/13142/ser2000-13142426.pdf?src-supplier=Mouser; ComponentLink5Description: https://datasheet.ciiva.com/13142/ser2000-13142426.pdf?src-supplier=Mouser
footprint SER2011-202MLD
pins: 1, 2, 3

## SER2915L-222KL
designator L?, comment 2.2uH
FIXED IND 2.2UH 30A 1.65MOHM SM; Manufacturer: Coilcraft; Manufacturer Part Number: SER2915L-222KL; Core Material: Ferrite; Tolerance: 10%; Self Resonant Frequency: 50MHz; Shielding: Shielded; Max DC Current: 84.8A; Test Frequency: 100kHz; Saturation Current: 82A; Item Type: Inductor; Supplier: Mouser; Supplier Part Number: 994-SER2915L-222KL; RoHS: Yes; Category: Fixed Inductors; Stock: 187; Pricing: 1=4.14, 10=4.14, 50=4.14, 100=4.14, 1000=3.01, 10000=3.01 (USD); Mounting Technology: Surface Mount; Case/Package: SMD/SMT; Min Operating Temperature: -40°C; Max Operating Temperature: 85°C; Packaging: Tray; Package Quantity: 25; Inductance Tolerance: 10%; Value: 2.2uH; Termination: SMD/SMT; RMS Current (Irms): 30A; Series: SER2915L; Length: 27.9mm; Width: 19.8mm; Height: 15.36mm; Reach SVHC Compliant: No; Lead Free: Contains Lead; RoHS Compliant: Yes; ComponentLink1URL: http://www.mouser.com/ds/2/597/ser2900-270685.pdf?src-supplier=Mouser; ComponentLink1Description: http://www.mouser.com/ds/2/597/ser2900-270685.pdf?src-supplier=Mouser; ComponentLink2URL: http://www.farnell.com/datasheets/1681984.pdf?src-supplier=Farnell; ComponentLink2Description: http://www.farnell.com/datasheets/1681984.pdf?src-supplier=Farnell; ComponentLink3URL: http://www.farnell.com/datasheets/1681984.pdf?src-supplier=Element14; ComponentLink3Description: http://www.farnell.com/datasheets/1681984.pdf?src-supplier=Element14
footprint SER2915L-222KL
pins: 1, 2, 3

## SLF7045T-220MR90-PF
designator L?, comment 22uH
FIXED IND 22UH 1.34A 73.2MOHM SM; Manufacturer: TDK; Manufacturer Part Number: SLF7045T-220MR90-PF; Core Material: Ferrite; Tolerance: 20%; Saturation Current: 900mA; Shielding: Shielded; DC Resistance (DCR): 61mR; Test Frequency: 100kHz; Item Type: Inductor; Supplier 1: RSComponents; RoHS: Yes; Category: Fixed Inductors; Stock 1: 650; Pricing 1: 10=0.64900, 100=0.61900, 500=0.49700, 1000=0.34500, 2500=0.32500 (GBP); Mount: Surface Mount; Case/Package: Nonstandard; Min Operating Temperature: -40°C; Max Operating Temperature: 85°C; Packaging: Tape and Reel; Inductance Tolerance: 20%; Package Quantity: 1; Current Rating: 1.34A; Resistor Type: Wirewound; Inductance: 22uH; Max DC Current: 900mA; Termination: SMD/SMT; RMS Current (Irms): 1.34A; DC Current: 1.34A; Series: SLF; Rated Current-Max: 900mA; Length: 0.276inch; Width: 0.276inch; Height: 4.5mm; Height - Seated (Max): 0.189inch; Depth: 7.2mm; Radiation Hardening: No; Reach SVHC Compliant: Yes; Military Standard: Not; Lead Free: Lead Free; RoHS Compliant: Yes; ComponentLink1URL: https://datasheet.ciiva.com/3866/84print-detail-pdf-phplangenpart-noslf7045t-220mr90-pfnreimp-unit-x-3866590.pdf?src-supplier=Arrow+Electronics; ComponentLink1Description: https://datasheet.ciiva.com/3866/84print-detail-pdf-phplangenpart-noslf7045t-220mr90-pfnreimp-unit-x-3866590.pdf?src-supplier=Arrow+Electronics; LCSC Part Number: C13754; Supplier Part Number 1: 9164248
footprint SLF7045T- 220MR90-PF
pins: 1, 2

## SLF7045T-221MR33-PF
designator L?, comment 220uH
330mA 220uH ±20% 330mA SMD Power Inductors ROHS; Manufacturer: TDK; Manufacturer Part Number: SLF7045T-221MR33-PF; Supplier: Rs; Supplier Part Number: 7413021P; RoHS: Yes; Category: Fixed Inductors; Stock: 2580; Pricing: 50=0.544, 250=0.517, 500=0.438 (GBP); ComponentLink1URL: https://datasheet.ciiva.com/11798/0900766b812b7d4f-11798998.pdf?src-supplier=Rs; ComponentLink1Description: https://datasheet.ciiva.com/11798/0900766b812b7d4f-11798998.pdf?src-supplier=Rs; ComponentLink2URL: https://datasheet.ciiva.com/3866/print-detail-pdf-phplangenpart-noslf7045t-221mr33-pfnreimp-unit-x-3866593.pdf?src-supplier=Arrow+Electronics; ComponentLink2Description: https://datasheet.ciiva.com/3866/print-detail-pdf-phplangenpart-noslf7045t-221mr33-pfnreimp-unit-x-3866593.pdf?src-supplier=Arrow+Electronics; ComponentLink3URL: https://datasheet.ciiva.com/8045/1838969-8045733.pdf?src-supplier=Element14; ComponentLink3Description: https://datasheet.ciiva.com/8045/1838969-8045733.pdf?src-supplier=Element14; ComponentLink4URL: https://datasheet.ciiva.com/15992/e531-slf7045-15992151.pdf?src-supplier=Onlinecomponents.com; ComponentLink4Description: https://datasheet.ciiva.com/15992/e531-slf7045-15992151.pdf?src-supplier=Onlinecomponents.com; ComponentLink5URL: https://datasheet.ciiva.com/30208/print-detail-pdf-phplangenpart-noslf7045t-221mr33-pfnreimp-unit-x-30208282.pdf?src-supplier=Onlinecomponents.com; ComponentLink5Description: https://datasheet.ciiva.com/30208/print-detail-pdf-phplangenpart-noslf7045t-221mr33-pfnreimp-unit-x-30208282.pdf?src-supplier=Onlinecomponents.com
footprint SLF7045T-221MR33-PF
pins: 1, 2

## SLF10145T-100M2R5-PF
designator L?, comment 10uH
FIXED IND 10UH 2.5A 43.7 MOHM; Manufacturer: TDK; Manufacturer Part Number: SLF10145T-100M2R5-PF; Core Material: Ferrite; Tolerance: 20%; Saturation Current: 3A; Shielding: Shielded; DC Resistance (DCR): 36.4mR; Test Frequency: 1kHz; Supplier 1: Digi-Key; Stock 1: 3269; Pricing 1: 1=1.05, 10=0.975, 25=0.9, 50=0.75, 100=0.705, 250=0.63 (USD); Mount: Surface Mount; Case/Package: Nonstandard; Number of Pins: 2; Min Operating Temperature: -40°C; Max Operating Temperature: 105°C; Inductance: 10uH; Max DC Current: 2.5A; Package Quantity: 500; Current Rating: 2.5A; Packaging: Tape and Reel; Inductance Tolerance: 20%; Resistor Type: Wirewound; Termination: SMD/SMT; DC Current: 2.5A; RMS Current (Irms): 3A; Series: SLF; Rated Current-Max: 3A; Length: 10.1mm; Width: 0.398inch; Height: 4.5mm; Height - Seated (Max): 0.189inch; Depth: 10.4mm; Radiation Hardening: No; REACH SVHC: No SVHC; Military Standard: Not; Lead Free: Lead Free; RoHS Compliant: Yes; ComponentLink1URL: http://www.farnell.com/datasheets/1838969.pdf?src-supplier=Element14; ComponentLink1Description: http://www.farnell.com/datasheets/1838969.pdf?src-supplier=Element14; ComponentLink2URL: http://uk.rs-online.com/webdocs/14e9/0900766b814e91a9.pdf?src-supplier=RSComponents; ComponentLink2Description: http://uk.rs-online.com/webdocs/14e9/0900766b814e91a9.pdf?src-supplier=RSComponents; ComponentLink3URL: http://components.arrow.com/part/dataview/42010891S8914805N1165?src-supplier=Arrow+Electronics; ComponentLink3Description: http://components.arrow.com/part/dataview/42010891S8914805N1165?src-supplier=Arrow+Electronics; ComponentLink4URL: http://datasheet.iiic.cc/tdk/SLF10145T-100M2R5-PF.pdf?src-supplier=IIIC; ComponentLink4Description: http://datasheet.iiic.cc/tdk/SLF10145T-100M2R5-PF.pdf?src-supplier=IIIC; Supplier Part Number 1: 445-1975-6-ND; LCSC Part Number: C96116
footprint SLF10145T-100M2R5-PF_
pins: 1, 2

## SLF12575T-221M1R3-PF
designator L?, comment 220uH
Inductor Power Shielded Wirewound 220uH 20% 1KHz Ferrite 1.3A 310mOhm DCR Blister; Manufacturer: TDK; Manufacturer Part Number: SLF12575T-221M1R3-PF; DC Resistance (DCR): 310mR; Supplier 1: Digi-Key; RoHS: Yes; Category: Fixed Inductors; Stock 1: 1079; Pricing 1: 1=1.97000, 10=1.81500, 25=1.66360, 50=1.42180, 100=1.27050, 250=1.08900 (USD); Mount: Surface Mount; Case/Package: Nonstandard; Core Material: Ferrite; Min Operating Temperature: -20°C; Max Operating Temperature: 105°C; Package Quantity: 500; Packaging: Tape and Reel; Tolerance: 20%; Shielding: Shielded; Inductance: 220uH; Current Rating: 1.3A; Saturation Current: 1.3A; Max DC Current: 1.3A; Termination: SMD/SMT; Resistor Type: Wirewound; Test Frequency: 1kHz; DC Current: 1.3A; Series: SLF; Length: 12.5mm; Width: 12.5mm; Height: 0.295inch; Height - Seated (Max): 0.309inch; Depth: 12.8mm; Military Standard: Not; Lead Free: Lead Free; RoHS Compliant: Yes; ComponentLink1URL: https://datasheet.ciiva.com/11802/0900766b812b7d4f-11802208.pdf?src-supplier=RSComponents; ComponentLink1Description: https://datasheet.ciiva.com/11802/0900766b812b7d4f-11802208.pdf?src-supplier=RSComponents; Supplier Part Number 1: 445-174412-1-ND; LCSC Part Number: C93225; Item Type: Inductor
footprint SLF12575T-221M1R3-PF
pins: 1, 2

## SLO1040H6R8MTT
designator L?, comment 6.8uH
7A 6.8uH ±20% SMD Power Inductors ROHS; Manufacturer: SUNLTECH; Manufacturer Part Number: SLO1040H6R8MTT; Supplier: LCSC; LCSC Part Number: C207852; RoHS: No; Item Type: Inductor
footprint SLO1040H6R8MTT
pins: 1, 2

## SLO252012F4R7MTT
designator L?, comment 4.7uH
1.55A 4.7uH ±20% SMD Power Inductors ROHS; Manufacturer: Sunltech Tech; Manufacturer Part Number: SLO252012F4R7MTT; Package: SMD; LCSC Part Number: C275675; Item Type: Inductor; ComponentLink1Description: LCSC; ComponentLink1URL: https://www.lcsc.com/product-detail/Power-Inductors_Sunltech-Tech-SLO252012F4R7MTT_C275675.html
footprint SLO252012F4R7MTT
pins: 1, 2

## SM5845-100MT
designator L?, comment 10uH
1.44A 10uH ±20% SMD Power Inductors ROHS; Manufacturer: SXN; Manufacturer Part Number: SM5845-100MT; Package: SMD; LCSC Part Number: C9164; Item Type: Inductor; ComponentLink1Description: LCSC; ComponentLink1URL: https://www.lcsc.com/product-detail/Power-Inductors_SXN-Shun-Xiang-Nuo-Elec-SM5845-100MT_C9164.html
footprint SM5845-100MT
pins: 1, 2

## SM5845-471MT
designator L?, comment 470uH
470uH ±20% SMD Power Inductors ROHS; Manufacturer: SXN(Shun Xiang Nuo Elec); Manufacturer Part Number: SM5845-471MT; Package: SMD,5.2x5.8mm; LCSC Part Number: C10125; Item Type: Inductor; ComponentLink1Description: LCSC; ComponentLink1URL: https://www.lcsc.com/product-detail/Power-Inductors_SXN-Shun-Xiang-Nuo-Elec-SM5845-471MT_C10125.html
footprint SM5845-100MT
pins: 1, 2

## SMDRI127-151MT
designator L?, comment 150uH
1.42A 150uH Shielded Power Inductors ±20% 2.7A SMD Power Inductors ROHS; Manufacturer: SXN(Shun Xiang Nuo Elec); Manufacturer Part Number: SMDRI127-151MT; Package: SMD; LCSC Part Number: C21325; Item Type: Inductor; ComponentLink1Description: LCSC; ComponentLink1URL: https://www.lcsc.com/product-detail/Power-Inductors_SXN-Shun-Xiang-Nuo-Elec-SMDRI127-151MT_C21325.html
footprint SMDRI127-151MT
pins: 1, 2

## SMDRI127-271MT
designator L?, comment 270uH
270uH ±20% Shielded Power Inductors 1.95A SMD,12.5x12.5x8mm Power Inductors ROHS; Manufacturer: SXN(Shun Xiang Nuo Elec); Manufacturer Part Number: SMDRI127-271MT; Package: SMD,12.5x12.5x8mm; LCSC Part Number: C6387930; Item Type: Inductor; ComponentLink1Description: LCSC; ComponentLink1URL: https://www.lcsc.com/product-detail/Power-Inductors_SXN-Shun-Xiang-Nuo-Elec-SMDRI127-271MT_C6387930.html
footprint SMDRI127-271MT
pins: 1, 2

## SMDRI127-470MT
designator L?, comment 47uH
2.5A 47uH ±20% SMD Power Inductors ROHS; Manufacturer: SXN(Shun Xiang Nuo Elec); Manufacturer Part Number: SMDRI127-470MT; Package: SMD; LCSC Part Number: C9906; Item Type: Inductor; ComponentLink1Description: LCSC; ComponentLink1URL: https://www.lcsc.com/product-detail/Power-Inductors_SXN-Shun-Xiang-Nuo-Elec-SMDRI127-470MT_C9906.html
footprint SMDRI127-470MT
pins: 1, 2

## SMDRI127-471MT
designator L?, comment 470uH
470uH Shielded Power Inductors ±20% 1.5A SMD Power Inductors ROHS; Manufacturer: SXN(Shun Xiang Nuo Elec); Manufacturer Part Number: SMDRI127-471MT; Package: SMD; LCSC Part Number: C10153; Item Type: Inductor; ComponentLink1Description: LCSC; ComponentLink1URL: https://www.lcsc.com/product-detail/Power-Inductors_SXN-Shun-Xiang-Nuo-Elec-SMDRI127-471MT_C10153.html
footprint SMDRI127-471MT
pins: 1, 2

## SMDRI129-330MT
designator L?, comment 33uH
3.6A 33uH Shielded Power Inductors ±20% 4.25A SMD,12.5x12.5mm Power Inductors ROHS; Manufacturer: SXN; Manufacturer Part Number: SMDRI129-330MT; Package: SMD,12.5x12.5mm; LCSC Part Number: C2924828; Item Type: Inductor; ComponentLink1Description: LCSC; ComponentLink1URL: https://www.lcsc.com/product-detail/Power-Inductors_SXN-Shun-Xiang-Nuo-Elec-SMDRI129-330MT_C2924828.html
footprint SMDRI129-330MT
pins: 1, 2

## SMMS1040-150M
designator L?, comment 15uH
6A 15uH Molding Choke ±20% 7A - Power Inductors ROHS; Manufacturer Part Number: SMMS1040-150M; Manufacturer: SXN; Footprint: SMD; Value: 15uH; LCSC Part Number: C149596; ComponentLink1Description: LCSC; ComponentLink1URL: https://www.lcsc.com/product-detail/Power-Inductors_SXN-Shun-Xiang-Nuo-Elec-SMMS1040-150M_C149596.html
footprint SMMS1040-150M
pins: 1, 2

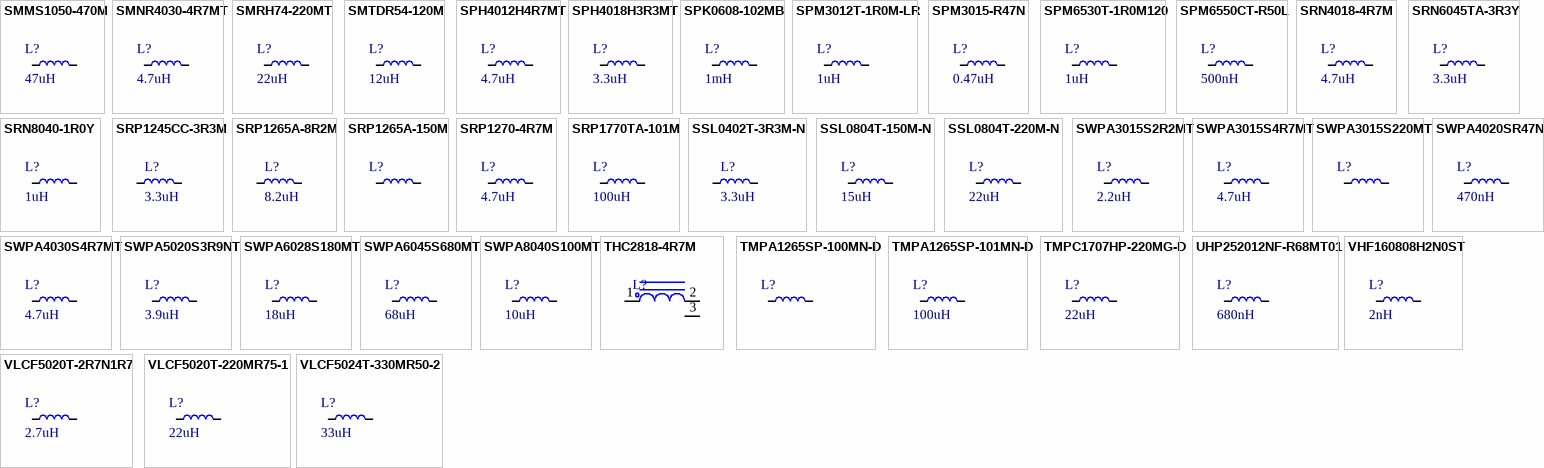
[diagram p6: symbols SMMS1050-470M to VLCF5024T-330MR50-2]

## SMMS1050-470M
designator L?, comment 47uH
3A 47uH Molding Choke ±20% 4.5A SMD Power Inductors ROHS; Manufacturer Part Number: SMMS1050-470M; Manufacturer: SXN; Footprint: SMD; Value: 47uH; LCSC Part Number: C149548; ComponentLink1Description: LCSC; ComponentLink1URL: https://www.lcsc.com/product-detail/Power-Inductors_SXN-Shun-Xiang-Nuo-Elec-SMMS1050-470M_C149548.html
footprint SMMS1050-470M
pins: 1, 2

## SMNR4030-4R7MT
designator L?, comment 4.7uH
2.9A 4.7uH ±20% 2.9A SMD,4x4mm Power Inductors ROHS; Manufacturer: SXN(Shun Xiang Nuo Elec); Manufacturer Part Number: SMNR4030-4R7MT; Package: SMD,4x4mm; LCSC Part Number: C135270; Item Type: Inductor; ComponentLink1Description: LCSC; ComponentLink1URL: https://www.lcsc.com/product-detail/Power-Inductors_SXN-Shun-Xiang-Nuo-Elec-SMNR4030-4R7MT_C135270.html?s_z=n_SMNR4030-4R7MT
footprint SMNR4030-4R7MT
pins: 1, 2

## SMRH74-220MT
designator L?, comment 22uH
22uH ±20% SMD Power Inductors ROHS; Manufacturer: SXN(Shun Xiang Nuo Elec); Manufacturer Part Number: SMRH74-220MT; Package: Custom; LCSC Part Number: C27442; Item Type: Inductor; ComponentLink1Description: LCSC; ComponentLink1URL: https://www.lcsc.com/product-detail/Power-Inductors_SXN-Shun-Xiang-Nuo-Elec-SMRH74-220MT_C27442.html
footprint SMRH74-220MT
pins: 1, 2

## SMTDR54-120M
designator L?, comment 12uH
1.4A 12uH ±20% SMD,5.2x5.8mm Power Inductors ROHS; Manufacturer: 3L COILS; Manufacturer Part Number: SMTDR54-120M; Footprint: Custom; ComponentLink1Description: LCSC; ComponentLink1URL: https://www.lcsc.com/product-detail/Power-Inductors_3L-COILS-SMTDR54-120M_C326234.html; Value: 12uH; LCSC Part Number: C326234
footprint SMTDR54-120M
pins: 1, 2